# Altium schematic symbol library SMA.SchLib: 1 symbol
Pins are listed as number, name and electrical type; pins without a type are passive.

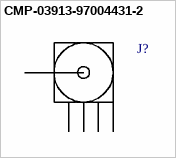
[diagram p0: symbol CMP-03913-97004431-2]

## CMP-03913-97004431-2
designator J?, comment 60312202114512  (value not drawn)
Rf Coax Conn, Sma Jack, 50 Ohm, Pcb Rohs Compliant: Yes |Wurth Elektronik 60312202114512; Impedance: 50Ω; Insulation Resistance: 5GΩ; Insertion Loss (dB): 0.14dB; Min Operating Temperature: -65°C; Max Operating Temperature: 165°C; Orientation: Straight; Connector Type: SMA; Insulation Material: PTFE
footprint 60312202114512 (SMA PCB End Launch Jack Flat  Tab for 1.1mm PCB)
pins: 1 Signal "Signal Pin", 2 GND, 3 GND, 4 GND, 5 GND